# Altium footprint library PcbLib1.PcbLib: 83 footprints (part 3 of 6)
Each footprint in its own frame and in the unit in brackets; x right, y up, seen from the top. Pads: shape width x height; smd on the part's side, far side on the other; paste and mask are expansions set on the pad; w line width, h text height; cw(c..) or ccw(c..) is an arc to the next point about the centre after c.
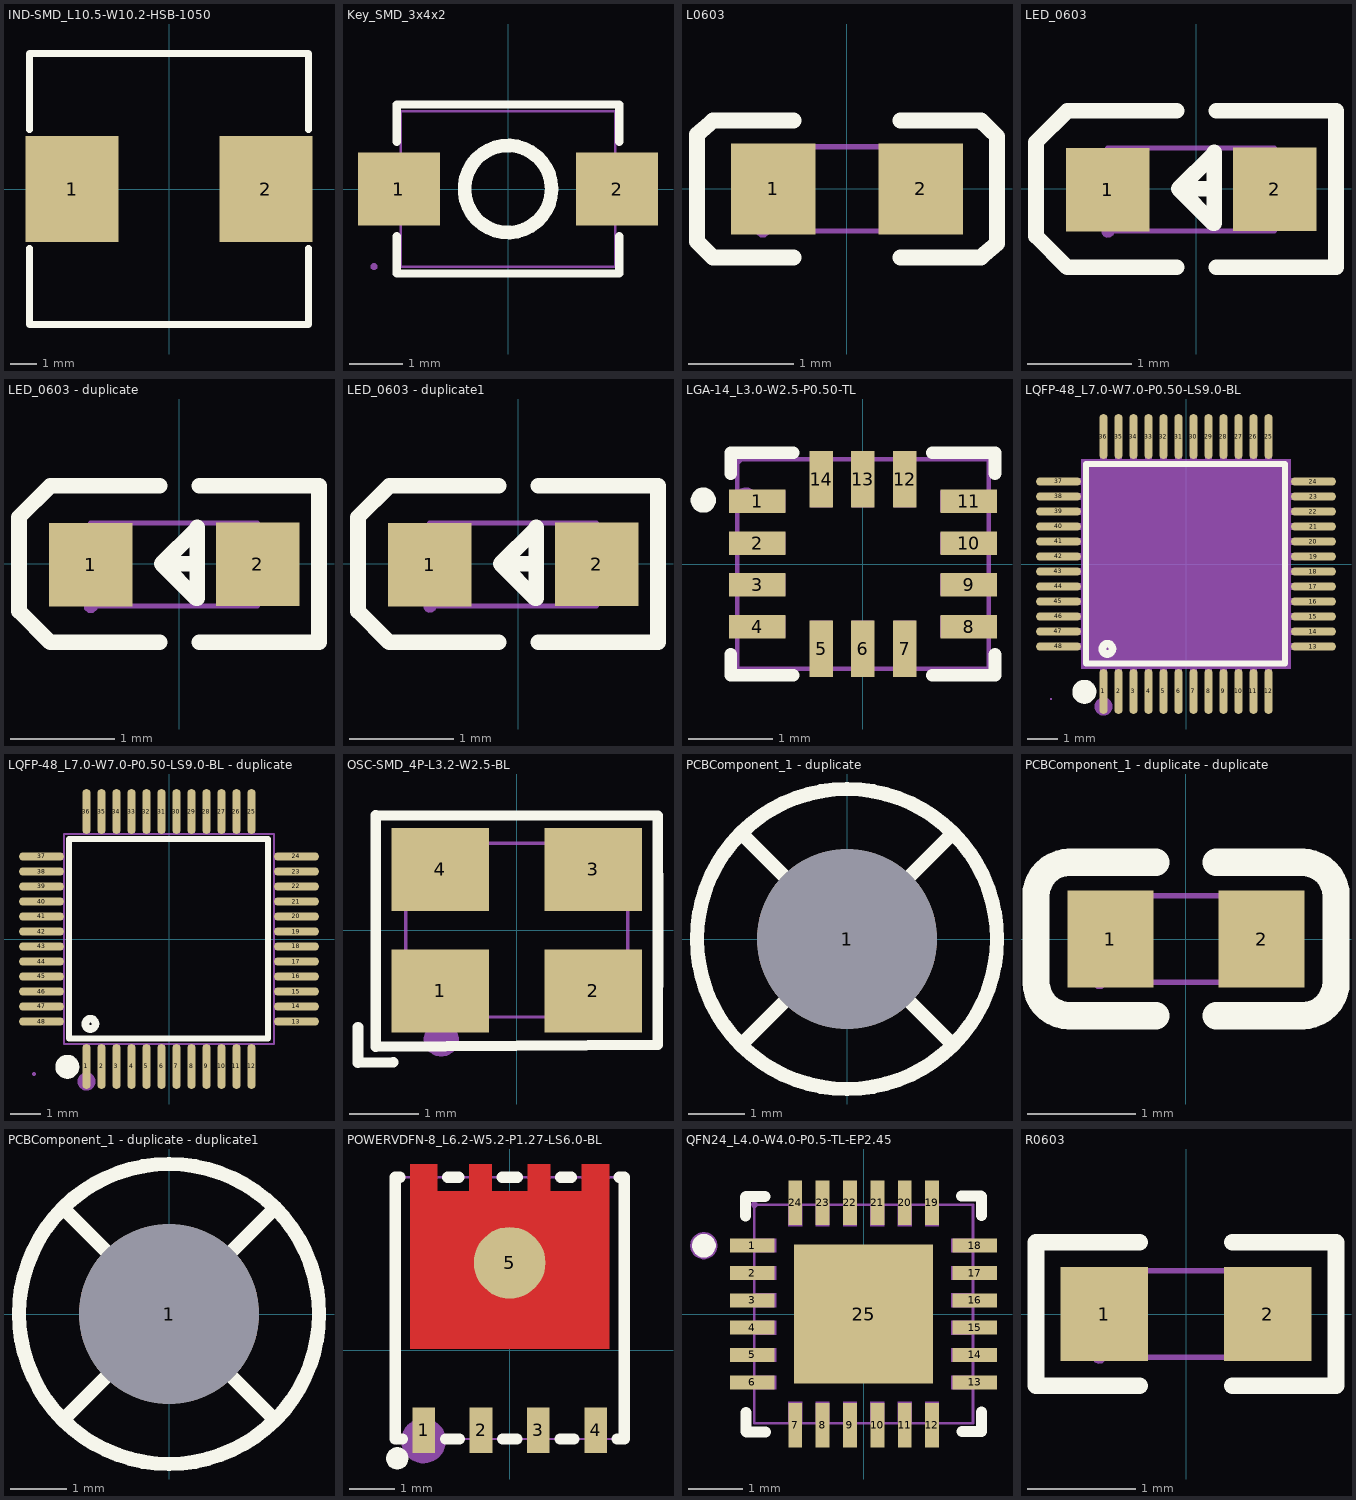
[diagram p2: the footprints below, top view; thin cyan lines are the x and y axes]

## IND-SMD_L10.5-W10.2-HSB-1050 [mm]
pads (2):
  rect 3.5x4 smd paste+0.051: 1(-3.65,0) 2(3.65,0)
Top Overlay:
  lines w0.254: -5.25,-2.231 -5.25,-5.1 5.25,-5.1 5.25,-2.231 ; -5.25,2.231 -5.25,5.1 5.25,5.1 5.25,2.231

## Key_SMD_3x4x2 [mm]
pads (2):
  rect 1.53x1.36 smd paste+0 mask+0.051: 1(-2.035,0) 2(2.035,0)
Top Overlay:
  circle w0.254: c0,0 r0.813
  lines w0.152: -2.076,-0.883 -2.076,-1.576 2.076,-1.576 2.076,-0.883 ; -2.076,0.883 -2.076,1.576 2.076,1.576 2.076,0.883
Mechanical 7:
  lines w0.051: -2,-1.45 -2,1.45 2,1.45 2,-1.45 -2,-1.45
Mechanical 8:
  region: -2.5,-1.51 -2.525,-1.51 -2.56,-1.475 -2.56,-1.425 -2.525,-1.39 -2.5,-1.39 -2.475,-1.39 -2.44,-1.425 -2.44,-1.475 -2.475,-1.51 -2.5,-1.51
Mechanical 9:
  region: -2.5,0.65 -2.5,-0.65 -1.3,-0.65 -1.3,0.65
  region: 2.5,0.65 2.5,-0.65 1.3,-0.65 1.3,0.65

## L0603 [mm]
pads (2):
  rect 0.8x0.864 smd paste-100 mask+0.051: 1(-0.7,0) 2(0.7,0)
Top Overlay:
  lines w0.152: -1.272,-0.65 -0.51,-0.65 ; -1.272,0.65 -0.51,0.65 ; -1.27,-0.651 -1.424,-0.499 -1.424,0.517 -1.27,0.65 ; 0.51,-0.65 1.272,-0.65 ; 0.51,0.65 1.272,0.65 ; 1.27,-0.65 1.424,-0.517 1.424,0.499 1.27,0.65
Top Paste:
  region: 0.264,0.154 0.264,-0.122 0.538,-0.416 1.042,-0.416 1.106,-0.352 1.106,0.384 1.042,0.448 0.538,0.448
  region: -0.252,0.143 -0.252,-0.134 -0.526,-0.427 -1.029,-0.427 -1.093,-0.363 -1.093,0.373 -1.029,0.437 -0.526,0.437
Mechanical 7:
  lines w0.051: -0.8,-0.4 -0.8,0.4 0.8,0.4 0.8,-0.4 -0.8,-0.4
Mechanical 8:
  region: -0.74,-0.4 -0.74,-0.425 -0.775,-0.46 -0.825,-0.46 -0.86,-0.425 -0.86,-0.4 -0.86,-0.375 -0.825,-0.34 -0.775,-0.34 -0.74,-0.375 -0.74,-0.4
Mechanical 9:
  region: -0.5,-0.4 -0.8,-0.4 -0.8,0.4 -0.5,0.4
  region: 0.8,-0.4 0.5,-0.4 0.5,0.4 0.8,0.4

## LED_0603 [mil]
pads (2):
  rect 31.5x31.5 smd paste+0 mask+2: 1(-33.5,-0.4) 2(29.5,-0.2)
Top Overlay:
  lines w5.9: -7.5,-29.7 -48.8,-29.7 -60.6,-17.9 -60.6,-13.9 -60.6,13.6 -60.6,17.6 -48.8,29.4 -7.5,29.4 ; 6.7,0 -6.7,0 ; 7.5,-29.6 52.7,-29.6 ; 7.5,29.5 52.7,29.5 52.7,-28.8 ; -6.7,0 6.7,13.3 6.7,13.7 6.7,-13 6.3,-13 -6.7,0
Mechanical 6:
  region: -44.1,2.1 -22.9,2.1 -22.9,-3 -44.1,-3
  region: 26.9,-10.8 26.9,10.4 32,10.4 32,-10.8
  region: 18.8,2.4 40.1,2.4 40.1,-2.7 18.8,-2.7
Mechanical 7:
  lines w2: -33.5,-16 29.5,-16 29.5,15.4 -33.5,15.4 -33.5,-16
Mechanical 8:
  region: -31.1,-16.2 -31.5,-17.5 -32.5,-18.4 -33.8,-18.6 -35.1,-18 -35.8,-16.9 -35.8,-15.5 -35.1,-14.4 -33.8,-13.8 -32.5,-14 -31.5,-14.9
Mechanical 9:
  region: -33.5,-16.2 -33.5,15.3 -21.7,15.3 -21.7,-16.2
  region: 17.7,-15.9 17.7,15.6 29.5,15.6 29.5,-15.9

## LED_0603 - duplicate [mil]
pads (2):
  rect 31.5x31.5 smd paste+0 mask+2: 1(-33.5,-0.4) 2(29.5,-0.2)
Top Overlay:
  lines w5.9: -7.5,-29.7 -48.8,-29.7 -60.6,-17.9 -60.6,-13.9 -60.6,13.6 -60.6,17.6 -48.8,29.4 -7.5,29.4 ; 6.7,0 -6.7,0 ; 7.5,-29.6 52.7,-29.6 ; 7.5,29.5 52.7,29.5 52.7,-28.8 ; -6.7,0 6.3,-13 6.7,-13 6.7,13.7 6.7,13.3 -6.7,0
Mechanical 6:
  region: 18.8,2.4 40.1,2.4 40.1,-2.7 18.8,-2.7
  region: 26.9,-10.8 26.9,10.4 32,10.4 32,-10.8
  region: -44.1,2.1 -22.9,2.1 -22.9,-3 -44.1,-3
Mechanical 7:
  lines w2: -33.5,-16 -33.5,15.4 29.5,15.4 29.5,-16 -33.5,-16
Mechanical 8:
  region: -33.5,-18.6 -34.49,-18.6 -35.9,-17.19 -35.9,-15.21 -34.49,-13.8 -33.5,-13.8 -32.51,-13.8 -31.1,-15.21 -31.1,-17.19 -32.51,-18.6 -33.5,-18.6
Mechanical 9:
  region: 17.7,-15.9 17.7,15.6 29.5,15.6 29.5,-15.9
  region: -33.5,-16.2 -33.5,15.3 -21.7,15.3 -21.7,-16.2

## LED_0603 - duplicate1 [mil]
pads (2):
  rect 31.5x31.5 smd paste+0 mask+2: 1(-33.5,-0.4) 2(29.5,-0.2)
Top Overlay:
  lines w5.9: -7.5,-29.7 -48.8,-29.7 -60.6,-17.9 -60.6,-13.9 -60.6,13.6 -60.6,17.6 -48.8,29.4 -7.5,29.4 ; 6.7,0 -6.7,0 ; 7.5,-29.6 52.7,-29.6 ; 7.5,29.5 52.7,29.5 52.7,-28.8 ; -6.7,0 6.3,-13 6.7,-13 6.7,13.7 6.7,13.3 -6.7,0
Mechanical 6:
  region: 18.8,2.4 40.1,2.4 40.1,-2.7 18.8,-2.7
  region: 26.9,-10.8 26.9,10.4 32,10.4 32,-10.8
  region: -44.1,2.1 -22.9,2.1 -22.9,-3 -44.1,-3
Mechanical 7:
  lines w2: -33.5,-16 -33.5,15.4 29.5,15.4 29.5,-16 -33.5,-16
Mechanical 8:
  region: -31.1,-16.2 -31.5,-17.5 -32.5,-18.4 -33.8,-18.6 -35.1,-18 -35.8,-16.9 -35.8,-15.5 -35.1,-14.4 -33.8,-13.8 -32.5,-14 -31.5,-14.9
Mechanical 9:
  region: 17.7,-15.9 17.7,15.6 29.5,15.6 29.5,-15.9
  region: -33.5,-16.2 -33.5,15.3 -21.7,15.3 -21.7,-16.2

## LGA-14_L3.0-W2.5-P0.50-TL [mm]
pads (14):
  rect 0.675x0.28 smd paste+0.051: 1(-1.262,0.75) 2(-1.262,0.25) 3(-1.262,-0.25) 4(-1.262,-0.75) 8(1.262,-0.75) 9(1.262,-0.25) 10(1.262,0.25) 11(1.262,0.75)
  rect 0.28x0.675 smd paste+0.051: 5(-0.5,-1.012) 6(0,-1.012) 7(0.5,-1.012) 12(0.5,1.012) 13(0,1.012) 14(-0.5,1.012)
Top Overlay:
  circle w0.15: c-1.905,0.762 r0.075
  lines w0.152: -1.576,-1.08 -1.576,-1.326 -0.831,-1.326 ; -1.576,1.08 -1.576,1.326 -0.831,1.326 ; 0.83,-1.326 1.576,-1.326 1.576,-1.08 ; 0.83,1.326 1.576,1.326 1.576,1.08
Mechanical 6:
  circle w0.15: c-1.397,0.762 r0.075
Mechanical 7:
  lines w0.051: -1.5,-1.25 -1.5,1.25 1.5,1.25 1.5,-1.25 -1.5,-1.25
Mechanical 8:
  region: -1.5,1.31 -1.475,1.31 -1.44,1.275 -1.44,1.225 -1.475,1.19 -1.5,1.19 -1.525,1.19 -1.56,1.225 -1.56,1.275 -1.525,1.31 -1.5,1.31
Mechanical 9:
  region: -1.4,0.875 -0.925,0.875 -0.925,0.625 -1.4,0.625
  region: -1.4,0.375 -0.925,0.375 -0.925,0.125 -1.4,0.125
  region: -1.4,-0.125 -0.925,-0.125 -0.925,-0.375 -1.4,-0.375
  region: -1.4,-0.625 -0.925,-0.625 -0.925,-0.875 -1.4,-0.875
  region: -0.625,-0.675 -0.375,-0.675 -0.375,-1.15 -0.625,-1.15
  region: -0.125,-0.675 0.125,-0.675 0.125,-1.15 -0.125,-1.15
  region: 0.375,-0.675 0.625,-0.675 0.625,-1.15 0.375,-1.15
  region: 0.925,-0.625 1.4,-0.625 1.4,-0.875 0.925,-0.875
  region: 0.925,-0.125 1.4,-0.125 1.4,-0.375 0.925,-0.375
  region: 0.925,0.375 1.4,0.375 1.4,0.125 0.925,0.125
  region: 0.925,0.875 1.4,0.875 1.4,0.625 0.925,0.625
  region: 0.375,1.15 0.625,1.15 0.625,0.675 0.375,0.675
  region: -0.125,1.15 0.125,1.15 0.125,0.675 -0.125,0.675
  region: -0.625,1.15 -0.375,1.15 -0.375,0.675 -0.625,0.675

## LQFP-48_L7.0-W7.0-P0.50-LS9.0-BL [mm]
pads (48):
  oval 0.27x1.5 smd paste+0 mask+0.05: 1(-2.75,-4.25) 2(-2.25,-4.25) 3(-1.75,-4.25) 4(-1.25,-4.25) 5(-0.75,-4.25) 6(-0.25,-4.25) 7(0.25,-4.25) 8(0.75,-4.25) 9(1.25,-4.25) 10(1.75,-4.25) 11(2.25,-4.25) 12(2.75,-4.25) 25(2.75,4.25) 26(2.25,4.25) 27(1.75,4.25) 28(1.25,4.25) 29(0.75,4.25) 30(0.25,4.25) 31(-0.25,4.25) 32(-0.75,4.25) 33(-1.25,4.25) 34(-1.75,4.25) 35(-2.25,4.25) 36(-2.75,4.25)
  oval 1.5x0.27 smd paste+0 mask+0.05: 13(4.25,-2.75) 14(4.25,-2.25) 15(4.25,-1.75) 16(4.25,-1.25) 17(4.25,-0.75) 18(4.25,-0.25) 19(4.25,0.25) 20(4.25,0.75) 21(4.25,1.25) 22(4.25,1.75) 23(4.25,2.25) 24(4.25,2.75) 37(-4.25,2.75) 38(-4.25,2.25) 39(-4.25,1.75) 40(-4.25,1.25) 41(-4.25,0.75) 42(-4.25,0.25) 43(-4.25,-0.25) 44(-4.25,-0.75) 45(-4.25,-1.25) 46(-4.25,-1.75) 47(-4.25,-2.25) 48(-4.25,-2.75)
Top Overlay:
  circle w0.254: c-2.62,-2.83 r0.17
  lines w0.2: -2.896,3.34 3.302,3.34 3.302,-3.315 -3.327,-3.315 -3.327,3.34 -2.565,3.34
  lines w0.4: -3.39,-4.06 ccw(c-3.389,-4.26) -3.387,-4.06
Mechanical 5:
  circle w0.3: c-2.75,-4.75 r0.15
Mechanical 9:
  region: -3.5,3.5 3.5,3.5 3.5,-3.5 -3.5,-3.5
Mechanical 10:
  drawing of 48 lines, arcs and shapes, not listed
Mechanical 11:
  region: -4.47,-4.5 -4.47,-4.503 -4.471,-4.509 -4.473,-4.514 -4.477,-4.519 -4.481,-4.523 -4.486,-4.527 -4.491,-4.529 -4.497,-4.53 -4.503,-4.53 -4.509,-4.529 -4.514,-4.527 -4.519,-4.523 -4.523,-4.519 -4.527,-4.514 -4.529,-4.509 -4.53,-4.503 -4.53,-4.5 -4.53,-4.497 -4.529,-4.491 -4.527,-4.486 -4.523,-4.481 -4.519,-4.477 -4.514,-4.473 -4.509,-4.471 -4.503,-4.47 -4.497,-4.47 -4.491,-4.471 -4.486,-4.473 -4.481,-4.477 -4.477,-4.481 -4.473,-4.486 -4.471,-4.491 -4.47,-4.497 -4.47,-4.5
Mechanical 12:
  drawing of 48 lines, arcs and shapes, not listed

## LQFP-48_L7.0-W7.0-P0.50-LS9.0-BL - duplicate [mm]
pads (48):
  oval 0.27x1.5 smd paste+0 mask+0.05: 1(-2.75,-4.25) 2(-2.25,-4.25) 3(-1.75,-4.25) 4(-1.25,-4.25) 5(-0.75,-4.25) 6(-0.25,-4.25) 7(0.25,-4.25) 8(0.75,-4.25) 9(1.25,-4.25) 10(1.75,-4.25) 11(2.25,-4.25) 12(2.75,-4.25) 25(2.75,4.25) 26(2.25,4.25) 27(1.75,4.25) 28(1.25,4.25) 29(0.75,4.25) 30(0.25,4.25) 31(-0.25,4.25) 32(-0.75,4.25) 33(-1.25,4.25) 34(-1.75,4.25) 35(-2.25,4.25) 36(-2.75,4.25)
  oval 1.5x0.27 smd paste+0 mask+0.05: 13(4.25,-2.75) 14(4.25,-2.25) 15(4.25,-1.75) 16(4.25,-1.25) 17(4.25,-0.75) 18(4.25,-0.25) 19(4.25,0.25) 20(4.25,0.75) 21(4.25,1.25) 22(4.25,1.75) 23(4.25,2.25) 24(4.25,2.75) 37(-4.25,2.75) 38(-4.25,2.25) 39(-4.25,1.75) 40(-4.25,1.25) 41(-4.25,0.75) 42(-4.25,0.25) 43(-4.25,-0.25) 44(-4.25,-0.75) 45(-4.25,-1.25) 46(-4.25,-1.75) 47(-4.25,-2.25) 48(-4.25,-2.75)
Top Overlay:
  circle w0.254: c-2.62,-2.83 r0.17
  lines w0.2: -2.896,3.34 3.302,3.34 3.302,-3.315 -3.327,-3.315 -3.327,3.34 -2.565,3.34
  lines w0.4: -3.39,-4.06 ccw(c-3.389,-4.26) -3.387,-4.06
Mechanical 6:
  circle w0.3: c-2.75,-4.75 r0.15
Mechanical 7:
  lines w0.051: -3.5,-3.5 3.5,-3.5 3.5,3.5 -3.5,3.5 -3.5,-3.5
Mechanical 8:
  region: -4.44,-4.5 -4.44,-4.525 -4.475,-4.56 -4.525,-4.56 -4.56,-4.525 -4.56,-4.5 -4.56,-4.475 -4.525,-4.44 -4.475,-4.44 -4.44,-4.475 -4.44,-4.5
Mechanical 9:
  drawing of 48 lines, arcs and shapes, not listed
Mechanical 10:
  drawing of 48 lines, arcs and shapes, not listed

## OSC-SMD_4P-L3.2-W2.5-BL [mm]
pads (4):
  rect 1.4x1.199 smd: 1(-1.101,-0.875) 2(1.101,-0.875) 3(1.101,0.875) 4(-1.101,0.875)
Top Overlay:
  lines w0.152: -2.286,-1.396 -2.286,-1.906 -1.778,-1.904 ; -2.03,-1.678 2.031,-1.651 2.033,0 2.031,1.651 -2.03,1.652 -2.03,-1.678
Mechanical 6:
  region: -1.739,-0.535 -1.703,-0.535 -1.703,-0.607 -1.739,-0.607
  region: -1.703,-0.535 -1.667,-0.535 -1.667,-0.607 -1.703,-0.607
  region: -1.667,-0.499 -1.631,-0.499 -1.631,-0.607 -1.667,-0.607
  region: -1.631,-0.463 -1.595,-0.463 -1.595,-0.571 -1.631,-0.571
  region: -1.595,-0.463 -1.559,-0.463 -1.557,-1.004 -1.593,-1.004
  region: -1.559,-0.427 -1.523,-0.427 -1.521,-1.004 -1.557,-1.004
  region: -1.523,-0.427 -1.487,-0.427 -1.485,-1.004 -1.521,-1.004
  region: -1.487,-0.427 -1.451,-0.427 -1.449,-1.004 -1.485,-1.004
  lines w0.254: -1.214,-1.566 -1.205,-1.518 -1.178,-1.476 -1.137,-1.449 -1.088,-1.44 -1.04,-1.449 -0.999,-1.476 -0.972,-1.518 -0.961,-1.568 -0.97,-1.616 -0.999,-1.656 -1.038,-1.685 -1.087,-1.694 -1.137,-1.683 -1.178,-1.656 -1.205,-1.615 -1.214,-1.566
Mechanical 7:
  lines w0.051: -1.598,-1.25 1.6,-1.248 1.6,1.252 -1.598,1.25 -1.598,-1.25
Mechanical 8:
  region: -1.541,-1.25 -1.548,-1.282 -1.575,-1.306 -1.607,-1.309 -1.64,-1.295 -1.658,-1.266 -1.658,-1.234 -1.64,-1.205 -1.607,-1.191 -1.575,-1.194 -1.548,-1.218
Mechanical 9:
  region: 0.6,-0.449 1.501,-0.449 1.5,-1.248 0.6,-1.25
  region: -1.501,-0.449 -0.6,-0.449 -0.6,-1.25 -1.5,-1.248
  region: -1.5,1.248 -0.6,1.25 -0.6,0.449 -1.5,0.451
  region: 0.6,1.25 1.5,1.248 1.501,0.449 0.6,0.449

## PCBComponent_1 - duplicate [mil]
pads (1):
  round 126 hole 126 paste+0 mask+4: 1(0,0)
Top Overlay:
  lines w10: -72.5,-72.5 72.5,72.5 ; -72.5,72.5 72.5,-72.5 ; -105,0 -104.6,9.1 -103.4,18.2 -101.4,27.2 -98.7,35.9 -95.2,44.4 -90.9,52.5 -86,60.2 -80.4,67.5 -74.2,74.2 -67.5,80.4 -60.2,86 -52.5,90.9 -44.4,95.2 -35.9,98.7 -27.2,101.4 -18.2,103.4 -9.2,104.6 0,105 9.2,104.6 18.2,103.4 27.2,101.4 35.9,98.7 44.4,95.2 52.5,90.9 60.2,86 67.5,80.4 74.2,74.2 80.4,67.5 86,60.2 90.9,52.5 95.2,44.4 98.7,35.9 101.4,27.2 103.4,18.2 104.6,9.1 105,0 104.6,-9.2 103.4,-18.2 101.4,-27.2 98.7,-35.9 95.2,-44.4 90.9,-52.5 86,-60.2 80.4,-67.5 74.2,-74.3 67.5,-80.4 60.2,-86 52.5,-90.9 44.4,-95.2 35.9,-98.7 27.2,-101.4 18.2,-103.4 9.2,-104.6 0,-105 -9.2,-104.6 -18.2,-103.4 -27.2,-101.4 -35.9,-98.7 -44.4,-95.2 -52.5,-90.9 -60.2,-86 -67.5,-80.4 -74.2,-74.3 -80.4,-67.5 -86,-60.2 -90.9,-52.5 -95.2,-44.4 -98.7,-35.9 -101.4,-27.2 -103.4,-18.2 -104.6,-9.2 -105,0

## PCBComponent_1 - duplicate - duplicate [mm]
pads (2):
  rect 0.8x0.9 smd paste+0.051: 1(-0.7,0) 2(0.7,0)
Top Overlay:
  lines w0.254: -1.08,-0.71 -0.28,-0.71 ; -1.08,0.71 -0.28,0.71 ; -1.08,-0.71 cw(c-1.08,-0.4) -1.39,-0.4 -1.39,0.4 cw(c-1.08,0.4) -1.08,0.71 ; 0.28,-0.71 1.08,-0.71 ccw(c1.08,-0.4) 1.39,-0.4 1.39,0.4 ccw(c1.08,0.4) 1.08,0.71 0.28,0.71
Mechanical 7:
  lines w0.051: -0.8,-0.4 -0.8,0.4 0.8,0.4 0.8,-0.4 -0.8,-0.4
Mechanical 8:
  region: -0.74,-0.4 -0.74,-0.425 -0.775,-0.46 -0.825,-0.46 -0.86,-0.425 -0.86,-0.4 -0.86,-0.375 -0.825,-0.34 -0.775,-0.34 -0.74,-0.375 -0.74,-0.4
Mechanical 9:
  region: -0.8,-0.4 -0.8,0.4 -0.5,0.4 -0.5,-0.4
  region: 0.8,-0.4 0.8,0.4 0.5,0.4 0.5,-0.4

## PCBComponent_1 - duplicate - duplicate1 [mil]
pads (1):
  round 126 hole 126 paste+0 mask+4: 1(0,0)
Top Overlay:
  lines w10: -72.5,-72.5 72.5,72.5 ; -72.5,72.5 72.5,-72.5 ; -105,0 -104.6,-9.1 -103.4,-18.2 -101.4,-27.1 -98.6,-35.9 -95.1,-44.3 -90.9,-52.5 -86,-60.2 -80.4,-67.5 -74.2,-74.2 -67.5,-80.4 -60.2,-86 -52.5,-90.9 -44.3,-95.1 -35.9,-98.6 -27.1,-101.4 -18.2,-103.4 -9.1,-104.6 0,-105 9.2,-104.6 18.3,-103.4 27.2,-101.4 35.9,-98.6 44.4,-95.1 52.5,-90.9 60.3,-86 67.5,-80.4 74.3,-74.2 80.5,-67.5 86,-60.2 91,-52.5 95.2,-44.3 98.7,-35.9 101.5,-27.1 103.4,-18.2 104.6,-9.1 105,0 104.6,9.2 103.4,18.3 101.5,27.2 98.7,35.9 95.2,44.4 91,52.5 86,60.3 80.5,67.5 74.3,74.3 67.5,80.5 60.3,86 52.5,91 44.4,95.2 35.9,98.7 27.2,101.5 18.3,103.4 9.2,104.6 0,105 -9.1,104.6 -18.2,103.4 -27.1,101.5 -35.9,98.7 -44.3,95.2 -52.5,91 -60.2,86 -67.5,80.5 -74.2,74.3 -80.4,67.5 -86,60.3 -90.9,52.5 -95.1,44.4 -98.6,35.9 -101.4,27.2 -103.4,18.3 -104.6,9.2 -105,0

## POWERVDFN-8_L6.2-W5.2-P1.27-LS6.0-BL [mil]
pads (5):
  rect 19.7x39.4 smd paste-3937 mask+2: 1(-75,-69.9) 2(-25,-69.9) 3(25,-69.9) 4(75,-69.9)
  round 62.5 smd: 5(0,76.2)
Top Layer:
  region: -86.6,1 -86.6,162.4 -63,162.4 -63,138.8 -35.4,138.8 -35.4,162.4 -15.7,162.4 -15.7,138.8 15.8,138.8 15.8,162.4 35.5,162.4 35.5,138.8 63,138.8 63,162.4 86.7,162.4 86.7,1
Top Overlay:
  lines w9.8: -102.9,-94.5 -102.5,-92.6 -101.5,-91 -99.9,-90 -98,-89.6 -96.1,-90 -94.5,-91 -93.4,-92.6 -93.1,-94.5 -93.4,-96.4 -94.5,-98 -96.1,-99 -98,-99.4 -99.9,-99 -101.5,-98 -102.5,-96.4 -102.9,-94.5
  lines w10: -95.7,150.8 -100,150.8 -100,136.4 -100,-63.6 -100,-77.6 -93.9,-77.6 ; -56,-77.6 -43.9,-77.6 ; -53.9,150.8 -44.5,150.8 ; -6.6,150.8 6.7,150.8 ; -6,-77.6 6.1,-77.6 ; 44,-77.6 56.1,-77.6 ; 44.6,150.8 53.9,150.8 ; 94,-77.6 100,-77.6 100,-63.6 100,136.4 100,150.8 95.8,150.8
Top Paste:
  region: 86.7,162.4 63,162.4 63,138.8 35.5,138.8 35.5,162.4 15.8,162.4 15.8,138.8 -15.7,138.8 -15.7,162.4 -35.4,162.4 -35.4,138.8 -63,138.8 -63,162.4 -86.6,162.4 -86.6,1 86.7,1 86.7,1.4
  region: -84.8,-89.6 -84.8,-50.2 -65.1,-50.2 -65.1,-89.6
  region: -34.8,-89.6 -34.8,-50.2 -15.1,-50.2 -15.1,-89.6
  region: 15.2,-89.6 15.2,-50.2 34.9,-50.2 34.9,-89.6
  region: 65.2,-89.6 65.2,-50.2 84.9,-50.2 84.9,-89.6
Mechanical 6:
  lines w19.7: -84.9,-80.5 -84.9,-77.8 -84.2,-75.2 -82.8,-72.9 -80.8,-71.1 -78.5,-69.9 -75.8,-69.3 -73.2,-69.5 -70.6,-70.4 -68.4,-72 -66.8,-74 -65.7,-76.5 -65.3,-79.1 -65.7,-81.8 -66.8,-84.3 -68.4,-86.3 -70.6,-87.9 -73.2,-88.8 -75.8,-89 -78.5,-88.4 -80.8,-87.2 -82.8,-85.4 -84.2,-83.1 -84.9,-80.5
Mechanical 7:
  lines w2: -98.4,-77.6 -98.4,150.8 98.5,150.8 98.5,-77.6 -98.4,-77.6
Mechanical 8:
  region: -96,-79.7 -96.4,-81 -97.4,-81.9 -98.7,-82.1 -99.9,-81.5 -100.7,-80.4 -100.7,-79.1 -99.9,-78 -98.7,-77.4 -97.4,-77.6 -96.4,-78.5
Mechanical 9:
  region: -82.9,153.5 -67.5,153.5 -67.6,133.7 -33.3,133.7 -33,153.4 -17.4,153.5 -17.3,133.8 16.7,133.9 16.9,153.4 32.6,153.3 32.5,133.8 66.9,133.8 66.9,153.4 82.5,153.5 82.7,133.7 82.9,8.8 -82.6,8.8 -83.9,153.5 -83.8,153.5
  region: 67.2,-79.7 67.2,-60.1 82.9,-60.1 82.9,-79.7
  region: 17.2,-79.7 17.2,-60.1 32.9,-60.1 32.9,-79.7
  region: -32.8,-79.7 -32.8,-60.1 -17.1,-60.1 -17.1,-79.7
  region: -82.8,-79.7 -82.8,-60.1 -67.1,-60.1 -67.1,-79.7

## QFN24_L4.0-W4.0-P0.5-TL-EP2.45 [mil]
pads (25):
  rect 32x10 smd paste+0 mask+2: 1(-80,49.2) 2(-80,29.5) 3(-80,9.8) 4(-80,-9.8) 5(-80,-29.5) 6(-80,-49.2) 13(80,-49.2) 14(80,-29.5) 15(80,-9.8) 16(80,9.8) 17(80,29.5) 18(80,49.2)
  rect 10x32 smd paste+0 mask+2: 7(-49.2,-80) 8(-29.5,-80) 9(-9.8,-80) 10(9.9,-80) 11(29.6,-80) 12(49.2,-80) 19(49.2,80) 20(29.6,80) 21(9.9,80) 22(-9.8,80) 23(-29.5,80) 24(-49.2,80)
  rect 100x100 smd paste+0 mask+2: 25(0,0)
Top Overlay:
  lines w7.9: -85,70.5 -85,84.3 ; -84.6,-84.7 -84.6,-70.9 ; -84.6,84.6 -70.8,84.6 ; -84.3,-85 -70.5,-85 ; 70.5,85 84.3,85 ; 70.9,-84.7 84.7,-84.7 ; 84.7,70.9 84.7,84.6 ; 85,-84.3 85,-70.5
  lines w10: -118.5,49.2 -118.2,50.7 -117.2,52 -115.8,52.7 -114.2,52.7 -112.8,52 -111.8,50.7 -111.4,49.2 -111.8,47.7 -112.8,46.4 -114.2,45.8 -115.8,45.8 -117.2,46.4 -118.2,47.7 -118.5,49.2
Mechanical 6:
  lines w9.8: -119.9,49.2 -119.5,51.1 -118.5,52.7 -116.9,53.7 -115,54.1 -113.1,53.7 -111.5,52.7 -110.4,51.1 -110.1,49.2 -110.4,47.3 -111.5,45.7 -113.1,44.7 -115,44.3 -116.9,44.7 -118.5,45.7 -119.5,47.3 -119.9,49.2
Mechanical 7:
  lines w2: -78.7,-78.7 78.8,-78.7 78.8,78.7 -78.7,78.7 -78.7,-78.7
Mechanical 8:
  region: -76.4,78.7 -76.7,77.5 -77.7,76.6 -79.1,76.4 -80.3,77 -81,78.1 -81,79.4 -80.3,80.5 -79.1,81.1 -77.7,80.9 -76.7,80
Mechanical 9:
  region: -48.2,-48.2 -48.2,48.2 48.3,48.2 48.3,-48.2
  region: -54.1,63 -54.1,78.7 -44.3,78.7 -44.3,63
  region: -34.4,63 -34.4,78.7 -24.6,78.7 -24.6,63
  region: -14.7,63 -14.7,78.7 -4.9,78.7 -4.9,63
  region: 4.9,63 4.9,78.7 14.8,78.7 14.8,63
  region: 24.6,63 24.6,78.7 34.5,78.7 34.5,63
  region: 44.3,63 44.3,78.7 54.2,78.7 54.2,63
  region: 63,44.3 63,54.1 78.8,54.1 78.8,44.3
  region: 63,24.6 63,34.4 78.8,34.4 78.8,24.6
  region: 63,4.9 63,14.8 78.8,14.8 78.8,4.9
  region: 63,-14.8 63,-4.9 78.8,-4.9 78.8,-14.8
  region: 63,-34.5 63,-24.6 78.8,-24.6 78.8,-34.5
  region: 63,-54.1 63,-44.3 78.8,-44.3 78.8,-54.1
  region: 44.3,-78.7 44.3,-63 54.2,-63 54.2,-78.7
  region: 24.6,-78.7 24.6,-63 34.5,-63 34.5,-78.7
  region: 4.9,-78.7 4.9,-63 14.8,-63 14.8,-78.7
  region: -14.7,-78.7 -14.7,-63 -4.9,-63 -4.9,-78.7
  region: -34.4,-78.7 -34.4,-63 -24.6,-63 -24.6,-78.7
  region: -54.1,-78.7 -54.1,-63 -44.3,-63 -44.3,-78.7
  region: -78.7,-54.1 -78.7,-44.3 -63,-44.3 -63,-54.1
  region: -78.7,-34.5 -78.7,-24.6 -63,-24.6 -63,-34.5
  region: -78.7,-14.8 -78.7,-4.9 -63,-4.9 -63,-14.8
  region: -78.7,4.9 -78.7,14.8 -63,14.8 -63,4.9
  region: -78.7,24.6 -78.7,34.4 -63,34.4 -63,24.6
  region: -78.7,44.3 -78.7,54.1 -63,54.1 -63,44.3

## R0603 [mil]
pads (2):
  rect 31.8x34 smd paste-3937 mask+2: 1(-29.7,0) 2(29.7,0)
Top Overlay:
  lines w6: -16.8,-26 -54.5,-26 -54.5,26 -16.8,26 ; 16.8,-26 54.5,-26 54.5,26 16.8,26
Top Paste:
  region: -14,15.7 -14,6.8 -28.9,6.8 -28.9,-6.2 -14,-6.2 -14,-15.7 -16,-17.7 -47.1,-17.7 -49,-15.7 -49,15.7 -47.1,17.7 -16,17.7
  region: 47,17.7 15.5,17.7 13.6,15.7 13.6,6.8 28.1,6.8 28.1,-6.2 13.6,-6.2 13.6,-15.7 15.5,-17.7 47,-17.7 49,-15.7 49,15.7
Mechanical 7:
  lines w2: -31.5,-15.7 31.5,-15.7 31.5,15.7 -31.5,15.7 -31.5,-15.7
Mechanical 8:
  region: -29.1,-15.8 -29.5,-17 -30.5,-17.9 -31.8,-18.1 -33.1,-17.5 -33.8,-16.4 -33.8,-15.1 -33.1,-14 -31.8,-13.4 -30.5,-13.6 -29.5,-14.5
Mechanical 9:
  region: 31.5,-15.7 31.5,15.7 19.7,15.7 19.7,-15.7
  region: -31.5,-15.7 -31.5,15.7 -19.7,15.7 -19.7,-15.7